# Altium footprint library amirlib.PcbLib: 456 footprints (part 27 of 29)
Each footprint in its own frame and in the unit in brackets; x right, y up, seen from the top. Pads: shape width x height; smd on the part's side, far side on the other; paste and mask are expansions set on the pad; w line width, h text height; cw(c..) or ccw(c..) is an arc to the next point about the centre after c.
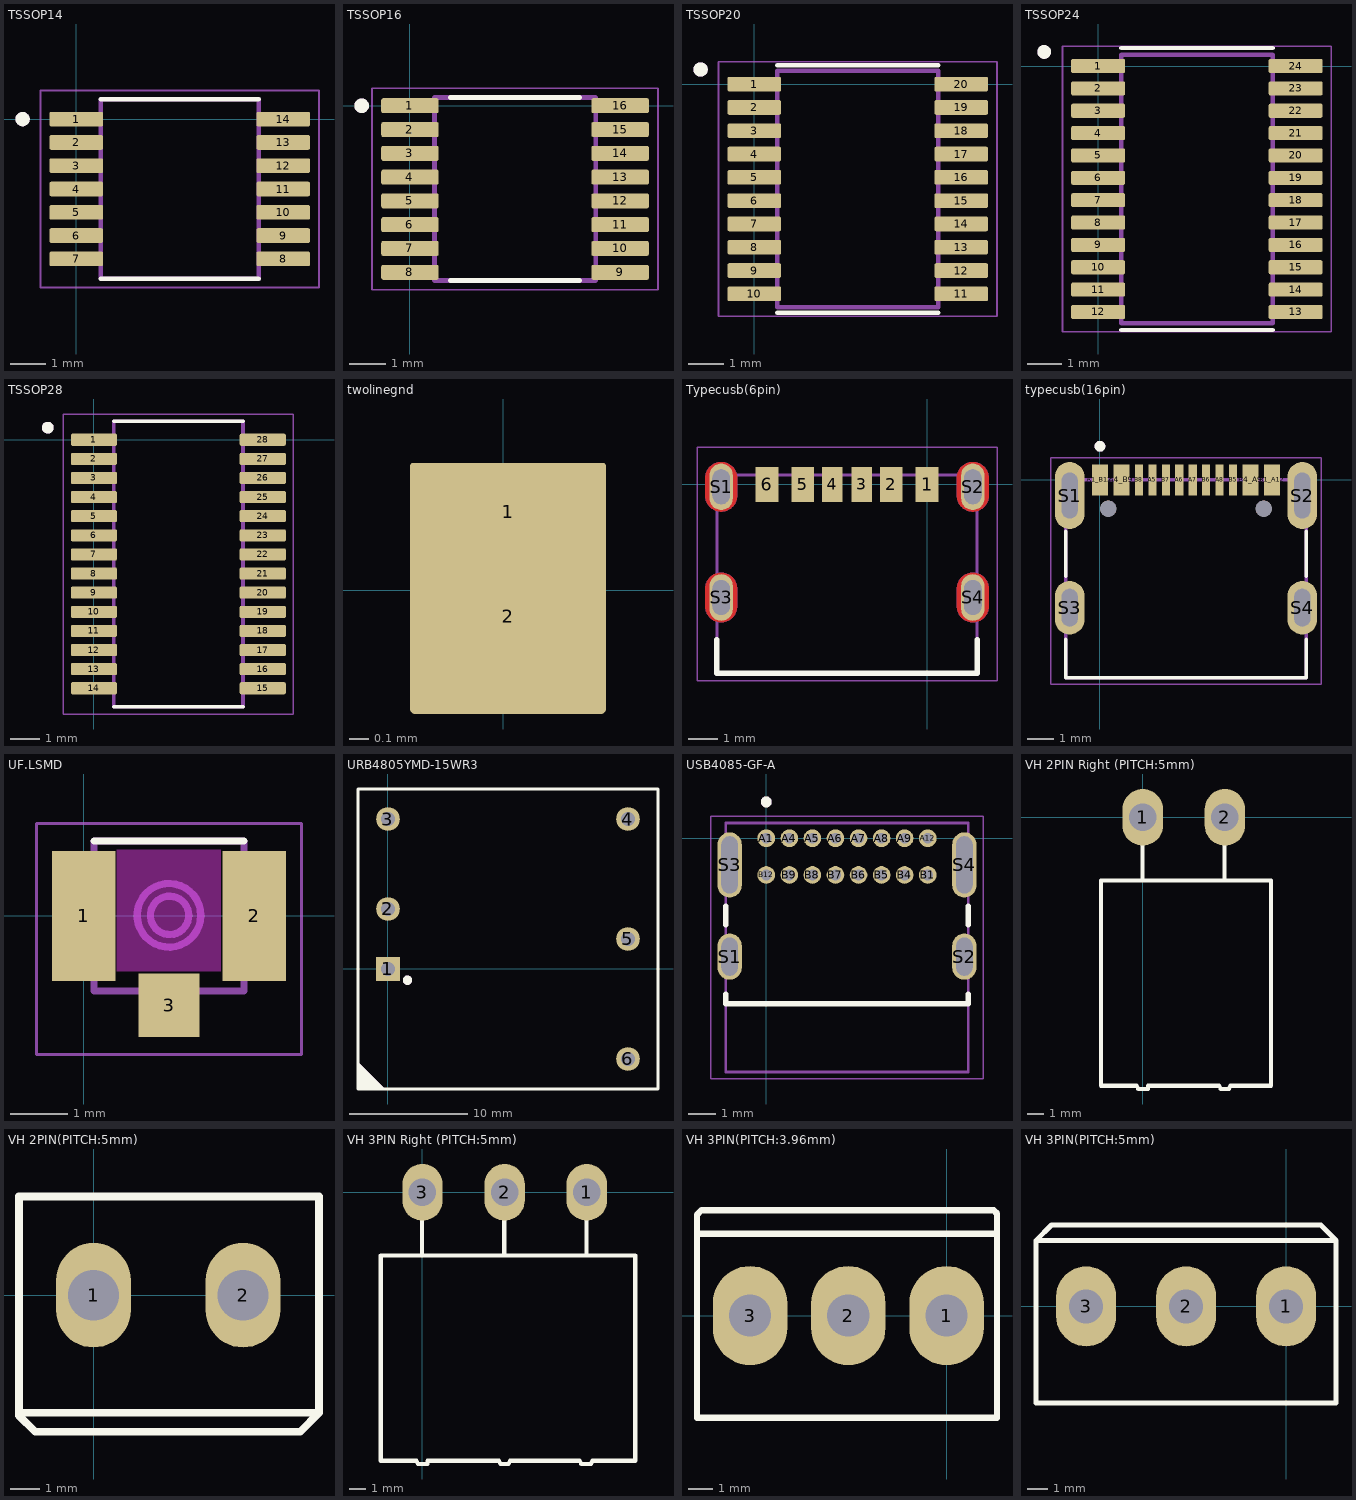
[diagram p26: the footprints below, top view; thin cyan lines are the x and y axes]

## TSSOP14 [mm]
pads (14):
  rrect25% 1.5x0.41 smd: 1(0,0) 2(0,-0.65) 3(0,-1.3) 4(0,-1.95) 5(0,-2.6) 6(0,-3.25) 7(0,-3.9) 8(5.77,-3.9) 9(5.77,-3.25) 10(5.77,-2.6) 11(5.77,-1.95) 12(5.77,-1.3) 13(5.77,-0.65) 14(5.77,0)
Top Overlay:
  circle w0.2: c-1.5,0 r0.1
  lines w0.127: 0.685,-4.45 5.085,-4.45 ; 0.685,0.55 5.085,0.55
Mechanical 13:
  circle w0.2: c-1.5,0 r0.1
  lines w0.127: 0.685,-4.45 5.085,-4.45 5.085,0.55 0.685,0.55 0.685,-4.45
Mechanical 15:
  lines w0.05: -1,-4.7 6.77,-4.7 6.77,0.8 -1,0.8 -1,-4.7
3D body "User Library-tssop14-2.STEP": height 1.2, standoff 0, extent -0.315,-4.5 6.085,0.6

## TSSOP16 [mm]
pads (16):
  rrect25% 1.57x0.41 smd: 1(0,0) 2(0,-0.65) 3(0,-1.3) 4(0,-1.95) 5(0,-2.6) 6(0,-3.25) 7(0,-3.9) 8(0,-4.55) 9(5.74,-4.55) 10(5.74,-3.9) 11(5.74,-3.25) 12(5.74,-2.6) 13(5.74,-1.95) 14(5.74,-1.3) 15(5.74,-0.65) 16(5.74,0)
Top Overlay:
  circle w0.2: c-1.32,0 r0.1
  lines w0.127: 1.105,-4.775 4.635,-4.775 ; 1.105,0.225 4.635,0.225
Mechanical 13:
  circle w0.2: c-1.32,0 r0.1
  lines w0.127: 0.67,-4.775 0.67,0.225 5.07,0.225 5.07,-4.775 0.67,-4.775
Mechanical 15:
  lines w0.05: -1.035,-5.025 -1.035,0.475 6.775,0.475 6.775,-5.025 -1.035,-5.025
3D body "step_temp.STEP": height 1.2, standoff 0, extent -0.33,-4.775 6.07,0.225

## TSSOP20 [mm]
pads (20):
  rrect25% 1.5x0.41 smd: 1(0,0) 2(0,-0.65) 3(0,-1.3) 4(0,-1.95) 5(0,-2.6) 6(0,-3.25) 7(0,-3.9) 8(0,-4.55) 9(0,-5.2) 10(0,-5.85) 11(5.77,-5.85) 12(5.77,-5.2) 13(5.77,-4.55) 14(5.77,-3.9) 15(5.77,-3.25) 16(5.77,-2.6) 17(5.77,-1.95) 18(5.77,-1.3) 19(5.77,-0.65) 20(5.77,0)
Top Overlay:
  circle w0.2: c-1.5,0.41 r0.1
  lines w0.127: 0.635,-6.375 5.135,-6.375 ; 0.635,0.525 5.135,0.525
Mechanical 13:
  circle w0.2: c-1.5,0.41 r0.1
  lines w0.127: 0.635,-6.225 0.635,0.375 5.135,0.375 5.135,-6.225 0.635,-6.225
Mechanical 15:
  lines w0.05: -1,-6.475 -1,0.625 6.77,0.625 6.77,-6.475 -1,-6.475
3D body "step_temp.STEP": height 1.1, standoff 0, extent -0.315,-6.175 6.085,0.325

## TSSOP24 [mm]
pads (24):
  rrect25% 1.57x0.41 smd: 1(0,0) 2(0,-0.65) 3(0,-1.3) 4(0,-1.95) 5(0,-2.6) 6(0,-3.25) 7(0,-3.9) 8(0,-4.55) 9(0,-5.2) 10(0,-5.85) 11(0,-6.5) 12(0,-7.15) 13(5.74,-7.15) 14(5.74,-6.5) 15(5.74,-5.85) 16(5.74,-5.2) 17(5.74,-4.55) 18(5.74,-3.9) 19(5.74,-3.25) 20(5.74,-2.6) 21(5.74,-1.95) 22(5.74,-1.3) 23(5.74,-0.65) 24(5.74,0)
Top Overlay:
  circle w0.2: c-1.57,0.41 r0.1
  lines w0.127: 0.67,-7.675 5.07,-7.675 ; 0.67,0.525 5.07,0.525
Mechanical 13:
  circle w0.2: c-1.57,0.41 r0.1
  lines w0.127: 0.67,-7.475 5.07,-7.475 5.07,0.325 0.67,0.325 0.67,-7.475
Mechanical 15:
  lines w0.05: -1.035,-7.725 6.775,-7.725 6.775,0.575 -1.035,0.575 -1.035,-7.725
3D body "step_temp.STEP": height 1.2, standoff 0, extent -0.33,-7.475 6.07,0.325

## TSSOP28 [mm]
pads (28):
  rrect25% 1.57x0.41 smd: 1(0,0) 2(0,-0.65) 3(0,-1.3) 4(0,-1.95) 5(0,-2.6) 6(0,-3.25) 7(0,-3.9) 8(0,-4.55) 9(0,-5.2) 10(0,-5.85) 11(0,-6.5) 12(0,-7.15) 13(0,-7.8) 14(0,-8.45) 15(5.74,-8.45) 16(5.74,-7.8) 17(5.74,-7.15) 18(5.74,-6.5) 19(5.74,-5.85) 20(5.74,-5.2) 21(5.74,-4.55) 22(5.74,-3.9) 23(5.74,-3.25) 24(5.74,-2.6) 25(5.74,-1.95) 26(5.74,-1.3) 27(5.74,-0.65) 28(5.74,0)
Top Overlay:
  circle w0.2: c-1.57,0.41 r0.1
  lines w0.127: 0.67,-9.075 5.07,-9.075 ; 0.67,0.625 5.07,0.625
Mechanical 13:
  circle w0.2: c-1.57,0.41 r0.1
  lines w0.127: 0.67,-9.075 0.67,0.625 5.07,0.625 5.07,-9.075 0.67,-9.075
Mechanical 15:
  lines w0.05: -1.035,-9.325 -1.035,0.875 6.775,0.875 6.775,-9.325 -1.035,-9.325
3D body "step_temp.STEP": height 1.1, standoff 0, extent -0.33,-9.075 6.07,0.625

## twolinegnd [mm]
pads (2):
  rrect5% 1x0.5 smd: 1(0.025,0.4)
  rrect5% 1x1 smd: 2(0.025,-0.132)
Top Layer:
  lines w0.5: 0.025,-0.132 0.025,0.4

## Typecusb(6pin) [mm]
pads (10):
  rect 0.8x1.2 smd: 1(0,0) 6(-5.5,0)
  rect 0.76x1.2 smd: 2(-1.23,0) 5(-4.27,0)
  rect 0.7x1.2 smd: 3(-2.25,0) 4(-3.25,0)
  oval 0.8x1.6 hole 0.6 slot 1.2 at 90 deg mask+0: S1(-7.07,-0.08) S2(1.57,-0.08) S3(-7.07,-3.88) S4(1.57,-3.88)
Top Layer:
  region: -7.041,-3.031 -7.013,-3.033 -6.984,-3.037 -6.956,-3.042 -6.928,-3.049 -6.9,-3.057 -6.873,-3.067 -6.846,-3.078 -6.82,-3.09 -6.795,-3.104 -6.77,-3.119 -6.747,-3.135 -6.724,-3.153 -6.702,-3.171 -6.681,-3.191 -6.661,-3.212 -6.643,-3.234 -6.625,-3.257 -6.609,-3.28 -6.594,-3.305 -6.58,-3.33 -6.568,-3.356 -6.557,-3.383 -6.547,-3.41 -6.539,-3.438 -6.532,-3.466 -6.527,-3.494 -6.523,-3.523 -6.521,-3.551 -6.52,-3.58 -6.52,-4.18 -6.521,-4.209 -6.523,-4.237 -6.527,-4.266 -6.532,-4.294 -6.539,-4.322 -6.547,-4.35 -6.557,-4.377 -6.568,-4.404 -6.58,-4.43 -6.594,-4.455 -6.609,-4.48 -6.625,-4.503 -6.643,-4.526 -6.661,-4.548 -6.681,-4.569 -6.702,-4.589 -6.724,-4.607 -6.747,-4.625 -6.77,-4.641 -6.795,-4.656 -6.82,-4.67 -6.846,-4.682 -6.873,-4.693 -6.9,-4.703 -6.928,-4.711 -6.956,-4.718 -6.984,-4.723 -7.013,-4.727 -7.041,-4.729 -7.07,-4.73 -7.099,-4.729 -7.127,-4.727 -7.156,-4.723 -7.184,-4.718 -7.212,-4.711 -7.24,-4.703 -7.267,-4.693 -7.294,-4.682 -7.32,-4.67 -7.345,-4.656 -7.37,-4.641 -7.393,-4.625 -7.416,-4.607 -7.438,-4.589 -7.459,-4.569 -7.479,-4.548 -7.497,-4.526 -7.515,-4.503 -7.531,-4.48 -7.546,-4.455 -7.56,-4.43 -7.572,-4.404 -7.583,-4.377 -7.593,-4.35 -7.601,-4.322 -7.608,-4.294 -7.613,-4.266 -7.617,-4.237 -7.619,-4.209 -7.62,-4.18 -7.62,-3.58 -7.619,-3.551 -7.617,-3.523 -7.613,-3.494 -7.608,-3.466 -7.601,-3.438 -7.593,-3.41 -7.583,-3.383 -7.572,-3.356 -7.56,-3.33 -7.546,-3.305 -7.531,-3.28 -7.515,-3.257 -7.497,-3.234 -7.479,-3.212 -7.459,-3.191 -7.438,-3.171 -7.416,-3.153 -7.393,-3.135 -7.37,-3.119 -7.345,-3.104 -7.32,-3.09 -7.294,-3.078 -7.267,-3.067 -7.24,-3.057 -7.212,-3.049 -7.184,-3.042 -7.156,-3.037 -7.127,-3.033 -7.099,-3.031 -7.07,-3.03
  region: 1.599,-3.031 1.627,-3.033 1.656,-3.037 1.684,-3.042 1.712,-3.049 1.74,-3.057 1.767,-3.067 1.794,-3.078 1.82,-3.09 1.845,-3.104 1.87,-3.119 1.893,-3.135 1.916,-3.153 1.938,-3.171 1.959,-3.191 1.979,-3.212 1.997,-3.234 2.015,-3.257 2.031,-3.28 2.046,-3.305 2.06,-3.33 2.072,-3.356 2.083,-3.383 2.093,-3.41 2.101,-3.438 2.108,-3.466 2.113,-3.494 2.117,-3.523 2.119,-3.551 2.12,-3.58 2.12,-4.18 2.119,-4.209 2.117,-4.237 2.113,-4.266 2.108,-4.294 2.101,-4.322 2.093,-4.35 2.083,-4.377 2.072,-4.404 2.06,-4.43 2.046,-4.455 2.031,-4.48 2.015,-4.503 1.997,-4.526 1.979,-4.548 1.959,-4.569 1.938,-4.589 1.916,-4.607 1.893,-4.625 1.87,-4.641 1.845,-4.656 1.82,-4.67 1.794,-4.682 1.767,-4.693 1.74,-4.703 1.712,-4.711 1.684,-4.718 1.656,-4.723 1.627,-4.727 1.599,-4.729 1.57,-4.73 1.541,-4.729 1.513,-4.727 1.484,-4.723 1.456,-4.718 1.428,-4.711 1.4,-4.703 1.373,-4.693 1.346,-4.682 1.32,-4.67 1.295,-4.656 1.27,-4.641 1.247,-4.625 1.224,-4.607 1.202,-4.589 1.181,-4.569 1.161,-4.548 1.143,-4.526 1.125,-4.503 1.109,-4.48 1.094,-4.455 1.08,-4.43 1.068,-4.404 1.057,-4.377 1.047,-4.35 1.039,-4.322 1.032,-4.294 1.027,-4.266 1.023,-4.237 1.021,-4.209 1.02,-4.18 1.02,-3.58 1.021,-3.551 1.023,-3.523 1.027,-3.494 1.032,-3.466 1.039,-3.438 1.047,-3.41 1.057,-3.383 1.068,-3.356 1.08,-3.33 1.094,-3.305 1.109,-3.28 1.125,-3.257 1.143,-3.234 1.161,-3.212 1.181,-3.191 1.202,-3.171 1.224,-3.153 1.247,-3.135 1.27,-3.119 1.295,-3.104 1.32,-3.09 1.346,-3.078 1.373,-3.067 1.4,-3.057 1.428,-3.049 1.456,-3.042 1.484,-3.037 1.513,-3.033 1.541,-3.031 1.57,-3.03
  region: -7.041,0.769 -7.013,0.767 -6.984,0.763 -6.956,0.758 -6.928,0.751 -6.9,0.743 -6.873,0.733 -6.846,0.722 -6.82,0.71 -6.795,0.696 -6.77,0.681 -6.747,0.665 -6.724,0.647 -6.702,0.629 -6.681,0.609 -6.661,0.588 -6.643,0.566 -6.625,0.543 -6.609,0.52 -6.594,0.495 -6.58,0.47 -6.568,0.444 -6.557,0.417 -6.547,0.39 -6.539,0.362 -6.532,0.334 -6.527,0.306 -6.523,0.277 -6.521,0.249 -6.52,0.22 -6.52,-0.38 -6.521,-0.409 -6.523,-0.437 -6.527,-0.466 -6.532,-0.494 -6.539,-0.522 -6.547,-0.55 -6.557,-0.577 -6.568,-0.604 -6.58,-0.63 -6.594,-0.655 -6.609,-0.68 -6.625,-0.703 -6.643,-0.726 -6.661,-0.748 -6.681,-0.769 -6.702,-0.789 -6.724,-0.807 -6.747,-0.825 -6.77,-0.841 -6.795,-0.856 -6.82,-0.87 -6.846,-0.882 -6.873,-0.893 -6.9,-0.903 -6.928,-0.911 -6.956,-0.918 -6.984,-0.923 -7.013,-0.927 -7.041,-0.929 -7.07,-0.93 -7.099,-0.929 -7.127,-0.927 -7.156,-0.923 -7.184,-0.918 -7.212,-0.911 -7.24,-0.903 -7.267,-0.893 -7.294,-0.882 -7.32,-0.87 -7.345,-0.856 -7.37,-0.841 -7.393,-0.825 -7.416,-0.807 -7.438,-0.789 -7.459,-0.769 -7.479,-0.748 -7.497,-0.726 -7.515,-0.703 -7.531,-0.68 -7.546,-0.655 -7.56,-0.63 -7.572,-0.604 -7.583,-0.577 -7.593,-0.55 -7.601,-0.522 -7.608,-0.494 -7.613,-0.466 -7.617,-0.437 -7.619,-0.409 -7.62,-0.38 -7.62,0.22 -7.619,0.249 -7.617,0.277 -7.613,0.306 -7.608,0.334 -7.601,0.362 -7.593,0.39 -7.583,0.417 -7.572,0.444 -7.56,0.47 -7.546,0.495 -7.531,0.52 -7.515,0.543 -7.497,0.566 -7.479,0.588 -7.459,0.609 -7.438,0.629 -7.416,0.647 -7.393,0.665 -7.37,0.681 -7.345,0.696 -7.32,0.71 -7.294,0.722 -7.267,0.733 -7.24,0.743 -7.212,0.751 -7.184,0.758 -7.156,0.763 -7.127,0.767 -7.099,0.769 -7.07,0.77
  region: 1.599,0.769 1.627,0.767 1.656,0.763 1.684,0.758 1.712,0.751 1.74,0.743 1.767,0.733 1.794,0.722 1.82,0.71 1.845,0.696 1.87,0.681 1.893,0.665 1.916,0.647 1.938,0.629 1.959,0.609 1.979,0.588 1.997,0.566 2.015,0.543 2.031,0.52 2.046,0.495 2.06,0.47 2.072,0.444 2.083,0.417 2.093,0.39 2.101,0.362 2.108,0.334 2.113,0.306 2.117,0.277 2.119,0.249 2.12,0.22 2.12,-0.38 2.119,-0.409 2.117,-0.437 2.113,-0.466 2.108,-0.494 2.101,-0.522 2.093,-0.55 2.083,-0.577 2.072,-0.604 2.06,-0.63 2.046,-0.655 2.031,-0.68 2.015,-0.703 1.997,-0.726 1.979,-0.748 1.959,-0.769 1.938,-0.789 1.916,-0.807 1.893,-0.825 1.87,-0.841 1.845,-0.856 1.82,-0.87 1.794,-0.882 1.767,-0.893 1.74,-0.903 1.712,-0.911 1.684,-0.918 1.656,-0.923 1.627,-0.927 1.599,-0.929 1.57,-0.93 1.541,-0.929 1.513,-0.927 1.484,-0.923 1.456,-0.918 1.428,-0.911 1.4,-0.903 1.373,-0.893 1.346,-0.882 1.32,-0.87 1.295,-0.856 1.27,-0.841 1.247,-0.825 1.224,-0.807 1.202,-0.789 1.181,-0.769 1.161,-0.748 1.143,-0.726 1.125,-0.703 1.109,-0.68 1.094,-0.655 1.08,-0.63 1.068,-0.604 1.057,-0.577 1.047,-0.55 1.039,-0.522 1.032,-0.494 1.027,-0.466 1.023,-0.437 1.021,-0.409 1.02,-0.38 1.02,0.22 1.021,0.249 1.023,0.277 1.027,0.306 1.032,0.334 1.039,0.362 1.047,0.39 1.057,0.417 1.068,0.444 1.08,0.47 1.094,0.495 1.109,0.52 1.125,0.543 1.143,0.566 1.161,0.588 1.181,0.609 1.202,0.629 1.224,0.647 1.247,0.665 1.27,0.681 1.295,0.696 1.32,0.71 1.346,0.722 1.373,0.733 1.4,0.743 1.428,0.751 1.456,0.758 1.484,0.763 1.513,0.767 1.541,0.769 1.57,0.77
Bottom Layer:
  region: -7.041,-3.031 -7.013,-3.033 -6.984,-3.037 -6.956,-3.042 -6.928,-3.049 -6.9,-3.057 -6.873,-3.067 -6.846,-3.078 -6.82,-3.09 -6.795,-3.104 -6.77,-3.119 -6.747,-3.135 -6.724,-3.153 -6.702,-3.171 -6.681,-3.191 -6.661,-3.212 -6.643,-3.234 -6.625,-3.257 -6.609,-3.28 -6.594,-3.305 -6.58,-3.33 -6.568,-3.356 -6.557,-3.383 -6.547,-3.41 -6.539,-3.438 -6.532,-3.466 -6.527,-3.494 -6.523,-3.523 -6.521,-3.551 -6.52,-3.58 -6.52,-4.18 -6.521,-4.209 -6.523,-4.237 -6.527,-4.266 -6.532,-4.294 -6.539,-4.322 -6.547,-4.35 -6.557,-4.377 -6.568,-4.404 -6.58,-4.43 -6.594,-4.455 -6.609,-4.48 -6.625,-4.503 -6.643,-4.526 -6.661,-4.548 -6.681,-4.569 -6.702,-4.589 -6.724,-4.607 -6.747,-4.625 -6.77,-4.641 -6.795,-4.656 -6.82,-4.67 -6.846,-4.682 -6.873,-4.693 -6.9,-4.703 -6.928,-4.711 -6.956,-4.718 -6.984,-4.723 -7.013,-4.727 -7.041,-4.729 -7.07,-4.73 -7.099,-4.729 -7.127,-4.727 -7.156,-4.723 -7.184,-4.718 -7.212,-4.711 -7.24,-4.703 -7.267,-4.693 -7.294,-4.682 -7.32,-4.67 -7.345,-4.656 -7.37,-4.641 -7.393,-4.625 -7.416,-4.607 -7.438,-4.589 -7.459,-4.569 -7.479,-4.548 -7.497,-4.526 -7.515,-4.503 -7.531,-4.48 -7.546,-4.455 -7.56,-4.43 -7.572,-4.404 -7.583,-4.377 -7.593,-4.35 -7.601,-4.322 -7.608,-4.294 -7.613,-4.266 -7.617,-4.237 -7.619,-4.209 -7.62,-4.18 -7.62,-3.58 -7.619,-3.551 -7.617,-3.523 -7.613,-3.494 -7.608,-3.466 -7.601,-3.438 -7.593,-3.41 -7.583,-3.383 -7.572,-3.356 -7.56,-3.33 -7.546,-3.305 -7.531,-3.28 -7.515,-3.257 -7.497,-3.234 -7.479,-3.212 -7.459,-3.191 -7.438,-3.171 -7.416,-3.153 -7.393,-3.135 -7.37,-3.119 -7.345,-3.104 -7.32,-3.09 -7.294,-3.078 -7.267,-3.067 -7.24,-3.057 -7.212,-3.049 -7.184,-3.042 -7.156,-3.037 -7.127,-3.033 -7.099,-3.031 -7.07,-3.03
  region: 1.599,-3.031 1.627,-3.033 1.656,-3.037 1.684,-3.042 1.712,-3.049 1.74,-3.057 1.767,-3.067 1.794,-3.078 1.82,-3.09 1.845,-3.104 1.87,-3.119 1.893,-3.135 1.916,-3.153 1.938,-3.171 1.959,-3.191 1.979,-3.212 1.997,-3.234 2.015,-3.257 2.031,-3.28 2.046,-3.305 2.06,-3.33 2.072,-3.356 2.083,-3.383 2.093,-3.41 2.101,-3.438 2.108,-3.466 2.113,-3.494 2.117,-3.523 2.119,-3.551 2.12,-3.58 2.12,-4.18 2.119,-4.209 2.117,-4.237 2.113,-4.266 2.108,-4.294 2.101,-4.322 2.093,-4.35 2.083,-4.377 2.072,-4.404 2.06,-4.43 2.046,-4.455 2.031,-4.48 2.015,-4.503 1.997,-4.526 1.979,-4.548 1.959,-4.569 1.938,-4.589 1.916,-4.607 1.893,-4.625 1.87,-4.641 1.845,-4.656 1.82,-4.67 1.794,-4.682 1.767,-4.693 1.74,-4.703 1.712,-4.711 1.684,-4.718 1.656,-4.723 1.627,-4.727 1.599,-4.729 1.57,-4.73 1.541,-4.729 1.513,-4.727 1.484,-4.723 1.456,-4.718 1.428,-4.711 1.4,-4.703 1.373,-4.693 1.346,-4.682 1.32,-4.67 1.295,-4.656 1.27,-4.641 1.247,-4.625 1.224,-4.607 1.202,-4.589 1.181,-4.569 1.161,-4.548 1.143,-4.526 1.125,-4.503 1.109,-4.48 1.094,-4.455 1.08,-4.43 1.068,-4.404 1.057,-4.377 1.047,-4.35 1.039,-4.322 1.032,-4.294 1.027,-4.266 1.023,-4.237 1.021,-4.209 1.02,-4.18 1.02,-3.58 1.021,-3.551 1.023,-3.523 1.027,-3.494 1.032,-3.466 1.039,-3.438 1.047,-3.41 1.057,-3.383 1.068,-3.356 1.08,-3.33 1.094,-3.305 1.109,-3.28 1.125,-3.257 1.143,-3.234 1.161,-3.212 1.181,-3.191 1.202,-3.171 1.224,-3.153 1.247,-3.135 1.27,-3.119 1.295,-3.104 1.32,-3.09 1.346,-3.078 1.373,-3.067 1.4,-3.057 1.428,-3.049 1.456,-3.042 1.484,-3.037 1.513,-3.033 1.541,-3.031 1.57,-3.03
  region: -7.041,0.769 -7.013,0.767 -6.984,0.763 -6.956,0.758 -6.928,0.751 -6.9,0.743 -6.873,0.733 -6.846,0.722 -6.82,0.71 -6.795,0.696 -6.77,0.681 -6.747,0.665 -6.724,0.647 -6.702,0.629 -6.681,0.609 -6.661,0.588 -6.643,0.566 -6.625,0.543 -6.609,0.52 -6.594,0.495 -6.58,0.47 -6.568,0.444 -6.557,0.417 -6.547,0.39 -6.539,0.362 -6.532,0.334 -6.527,0.306 -6.523,0.277 -6.521,0.249 -6.52,0.22 -6.52,-0.38 -6.521,-0.409 -6.523,-0.437 -6.527,-0.466 -6.532,-0.494 -6.539,-0.522 -6.547,-0.55 -6.557,-0.577 -6.568,-0.604 -6.58,-0.63 -6.594,-0.655 -6.609,-0.68 -6.625,-0.703 -6.643,-0.726 -6.661,-0.748 -6.681,-0.769 -6.702,-0.789 -6.724,-0.807 -6.747,-0.825 -6.77,-0.841 -6.795,-0.856 -6.82,-0.87 -6.846,-0.882 -6.873,-0.893 -6.9,-0.903 -6.928,-0.911 -6.956,-0.918 -6.984,-0.923 -7.013,-0.927 -7.041,-0.929 -7.07,-0.93 -7.099,-0.929 -7.127,-0.927 -7.156,-0.923 -7.184,-0.918 -7.212,-0.911 -7.24,-0.903 -7.267,-0.893 -7.294,-0.882 -7.32,-0.87 -7.345,-0.856 -7.37,-0.841 -7.393,-0.825 -7.416,-0.807 -7.438,-0.789 -7.459,-0.769 -7.479,-0.748 -7.497,-0.726 -7.515,-0.703 -7.531,-0.68 -7.546,-0.655 -7.56,-0.63 -7.572,-0.604 -7.583,-0.577 -7.593,-0.55 -7.601,-0.522 -7.608,-0.494 -7.613,-0.466 -7.617,-0.437 -7.619,-0.409 -7.62,-0.38 -7.62,0.22 -7.619,0.249 -7.617,0.277 -7.613,0.306 -7.608,0.334 -7.601,0.362 -7.593,0.39 -7.583,0.417 -7.572,0.444 -7.56,0.47 -7.546,0.495 -7.531,0.52 -7.515,0.543 -7.497,0.566 -7.479,0.588 -7.459,0.609 -7.438,0.629 -7.416,0.647 -7.393,0.665 -7.37,0.681 -7.345,0.696 -7.32,0.71 -7.294,0.722 -7.267,0.733 -7.24,0.743 -7.212,0.751 -7.184,0.758 -7.156,0.763 -7.127,0.767 -7.099,0.769 -7.07,0.77
  region: 1.599,0.769 1.627,0.767 1.656,0.763 1.684,0.758 1.712,0.751 1.74,0.743 1.767,0.733 1.794,0.722 1.82,0.71 1.845,0.696 1.87,0.681 1.893,0.665 1.916,0.647 1.938,0.629 1.959,0.609 1.979,0.588 1.997,0.566 2.015,0.543 2.031,0.52 2.046,0.495 2.06,0.47 2.072,0.444 2.083,0.417 2.093,0.39 2.101,0.362 2.108,0.334 2.113,0.306 2.117,0.277 2.119,0.249 2.12,0.22 2.12,-0.38 2.119,-0.409 2.117,-0.437 2.113,-0.466 2.108,-0.494 2.101,-0.522 2.093,-0.55 2.083,-0.577 2.072,-0.604 2.06,-0.63 2.046,-0.655 2.031,-0.68 2.015,-0.703 1.997,-0.726 1.979,-0.748 1.959,-0.769 1.938,-0.789 1.916,-0.807 1.893,-0.825 1.87,-0.841 1.845,-0.856 1.82,-0.87 1.794,-0.882 1.767,-0.893 1.74,-0.903 1.712,-0.911 1.684,-0.918 1.656,-0.923 1.627,-0.927 1.599,-0.929 1.57,-0.93 1.541,-0.929 1.513,-0.927 1.484,-0.923 1.456,-0.918 1.428,-0.911 1.4,-0.903 1.373,-0.893 1.346,-0.882 1.32,-0.87 1.295,-0.856 1.27,-0.841 1.247,-0.825 1.224,-0.807 1.202,-0.789 1.181,-0.769 1.161,-0.748 1.143,-0.726 1.125,-0.703 1.109,-0.68 1.094,-0.655 1.08,-0.63 1.068,-0.604 1.057,-0.577 1.047,-0.55 1.039,-0.522 1.032,-0.494 1.027,-0.466 1.023,-0.437 1.021,-0.409 1.02,-0.38 1.02,0.22 1.021,0.249 1.023,0.277 1.027,0.306 1.032,0.334 1.039,0.362 1.047,0.39 1.057,0.417 1.068,0.444 1.08,0.47 1.094,0.495 1.109,0.52 1.125,0.543 1.143,0.566 1.161,0.588 1.181,0.609 1.202,0.629 1.224,0.647 1.247,0.665 1.27,0.681 1.295,0.696 1.32,0.71 1.346,0.722 1.373,0.733 1.4,0.743 1.428,0.751 1.456,0.758 1.484,0.763 1.513,0.767 1.541,0.769 1.57,0.77
Top Overlay:
  lines w0.2: -7.22,-5.33 -7.22,-6.48 1.72,-6.48 1.72,-5.33
Top Solder:
  drawing of 4 lines, arcs and shapes, not listed
Bottom Solder:
  drawing of 4 lines, arcs and shapes, not listed
Mechanical 13:
  lines w0.1: -7.22,-6.48 1.72,-6.48 1.72,0.32 -7.22,0.32 -7.22,-6.48
Mechanical 15:
  lines w0.05: -7.9,-6.73 2.4,-6.73 2.4,1.27 -7.9,1.27 -7.9,-6.73
3D body "USB4125-GF-A-0190--3DModel-STEP-56544.STEP": height 3.26, standoff -2.15, extent -7.22,-6.403 1.72,0.497

## typecusb(16pin) [mm]
pads (18):
  rect 0.6x1.14 smd mask+0.05: A1_B12(0,0) A4_B9(0.8,0) B1_A12(6.4,0) B4_A9(5.6,0)
  rect 0.3x1.14 smd mask+0.05: A5(1.95,0) A6(2.95,0) A7(3.45,0) A8(4.45,0) B5(4.95,0) B6(3.95,0) B7(2.45,0) B8(1.45,0)
  oval 1.1x2.5 hole 0.6 slot 1.7 at 90 deg: S1(-1.125,-0.58) S2(7.525,-0.58)
  oval 1.1x2 hole 0.6 slot 1.4 at 90 deg: S3(-1.125,-4.75) S4(7.525,-4.75)
  round 0.6 hole 0.6 unplated: ""(0.31,-1.07) ""(6.09,-1.07)
Top Overlay:
  circle w0.2: c0,1.25 r0.1
  lines w0.127: -1.27,-5.92 -1.27,-7.35 7.67,-7.35 7.67,-5.92 ; -1.27,-3.58 -1.27,-1.9 ; 7.67,-3.58 7.67,-1.9
Mechanical 13:
  circle w0.2: c0,1.25 r0.1
  lines w0.127: -1.27,-7.35 7.67,-7.35 7.67,0 -1.27,0 -1.27,-7.35
Mechanical 15:
  lines w0.05: -1.825,-7.6 -1.825,0.82 8.225,0.82 8.225,-7.6 -1.825,-7.6
3D body "step_temp.STEP": height 3.31, standoff -0.99, extent -1.27,-7.35 7.67,0.555

## UF.LSMD [mm]
pads (3):
  rect 1.1x2.25 smd: 1(0,0) 2(2.95,0)
  rect 1.05x1.1 smd: 3(1.475,-1.55)
Top Overlay:
  lines w0.127: 0.175,1.3 2.775,1.3
Keep-Out Layer:
  region: 2.375,-0.963 0.572,-0.963 0.572,1.15 2.375,1.15
Mechanical 13:
  circle w0.127: c1.485,0.01 r0.332
  circle w0.127: c1.475,0.01 r0.552
  lines w0.127: 0.145,0.88 0.145,0.87 -0.095,0.87 -0.095,-0.87 0.175,-0.87 ; 2.815,-0.87 3.045,-0.87 3.045,0.87 2.855,0.87 ; 0.175,-0.87 0.175,-1.3 2.775,-1.3 2.775,1.3 0.175,1.3 0.175,-0.87
Mechanical 14:
  lines w0.127: 2.815,-0.91 2.815,-0.9
Mechanical 15:
  lines w0.05: -0.825,-2.4 -0.825,1.6 3.775,1.6 3.775,-2.4 -0.825,-2.4
3D body "step_temp.STEP": height 1.25, standoff 0, extent -0.025,-1.55 2.975,1.55

## URB4805YMD-15WR3 [mm]
pads (6):
  rect 2x2 hole 1.2 paste-2539.97 mask+0.05: 1(0,0)
  round 2 hole 1.2 paste-2539.97 mask+0.05: 2(0,5.08) 3(0,12.7) 4(20.32,12.7) 5(20.32,2.54) 6(20.32,-7.62)
Top Overlay:
  circle w0.4: c1.65,-0.95 r0.2
  region: -2.54,-10.16 -2.54,-7.874 -2.413,-8.001 -0.254,-10.16
  lines w0.254: -2.54,-10.16 -2.54,15.24 22.86,15.24 22.86,-10.16 -2.54,-10.16
Mechanical 15:
  circle w0.4: c1.65,-0.95 r0.2
  region: -2.54,-10.16 -2.54,-7.874 -2.413,-8.001 -0.254,-10.16

## USB4085-GF-A [mm]
pads (20):
  round 0.65 hole 0.4: A1(0,0) A4(0.85,0) A5(1.7,0) A6(2.55,0) A7(3.4,0) A8(4.25,0) A9(5.1,0) A12(5.95,0) B1(5.95,-1.35) B4(5.1,-1.35) B5(4.25,-1.35) B6(3.4,-1.35) B7(2.55,-1.35) B8(1.7,-1.35) B9(0.85,-1.35) B12(0,-1.35)
  oval 0.9x1.7 hole 0.6 slot 1.4 at 90 deg: S1(-1.35,-4.36) S2(7.3,-4.36)
  oval 0.9x2.4 hole 0.6 slot 2.1 at 90 deg: S3(-1.35,-0.98) S4(7.3,-0.98)
Top Overlay:
  circle w0.2: c0,1.34 r0.1
  lines w0.2: -1.495,-5.75 -1.495,-6.1 7.445,-6.1 7.445,-5.75 ; -1.495,-3.19 -1.495,-2.51 ; 7.445,-3.19 7.445,-2.51
Mechanical 13:
  circle w0.2: c0,1.34 r0.1
  lines w0.1: -1.495,-8.61 -1.495,-6.1 -1.495,0.56 7.445,0.56 7.445,-8.61 -1.495,-8.61
Mechanical 15:
  lines w0.05: -2.05,-8.86 -2.05,0.81 8,0.81 8,-8.86 -2.05,-8.86
3D body "step_temp.STEP": height 3.46, standoff -2.1, extent -1.495,-8.61 7.445,0.56

## VH 2PIN Right (PITCH:5mm) [mm]
pads (2):
  oval 2.5x3.5 hole 1.7 paste-2539.97 mask+0.05: 1(0,0) 2(5.08,0)
Top Overlay:
  lines w0.254: -0.02,-3.8 -0.02,-1.531 ; 5.06,-3.8 5.06,-1.531 ; -2.58,-16.6 -0.38,-16.6 -0.28,-16.8 0.32,-16.8 0.32,-16.6 4.72,-16.6 4.82,-16.8 5.32,-16.8 5.42,-16.6 7.925,-16.6 7.925,-3.9 -2.58,-3.9 -2.58,-16.6

## VH 2PIN(PITCH:5mm) [mm]
pads (2):
  oval 2.5x3.5 hole 1.7: 1(0,0) 2(5,0)
Top Overlay:
  lines w0.254: -2.493,3.302 7.507,3.302 ; -2.493,3.316 -2.493,-3.937 ; 7.54,3.302 7.54,-3.937 ; -2.493,-3.937 -2.493,-4.024 -1.945,-4.572 6.905,-4.572 7.54,-3.937 ; -2.493,-3.937 7.54,-3.937
3D body "2ps-io-arc&motor.STEP": height 10.08, standoff -3.51, extent -2.522,-4.663 7.536,3.302

## VH 3PIN Right (PITCH:5mm) [mm]
pads (3):
  oval 2.5x3.5 hole 1.7 paste-2539.97 mask+0.05: 1(10.16,0) 2(5.08,0) 3(0,0)
Top Overlay:
  lines w0.254: -0.02,-3.8 -0.02,-1.531 ; 5.06,-3.8 5.06,-1.531 ; 10.14,-3.8 10.14,-1.531 ; -2.58,-16.6 -0.38,-16.6 -0.28,-16.8 0.32,-16.8 0.32,-16.6 4.72,-16.6 4.82,-16.8 5.32,-16.8 5.42,-16.6 9.72,-16.6 9.82,-16.8 10.42,-16.8 10.52,-16.6 13.157,-16.6 13.157,-3.9 -2.58,-3.9 -2.58,-16.6

## VH 3PIN(PITCH:3.96mm) [mm]
pads (3):
  oval 3x4 hole 1.7: 1(0,0) 2(-3.96,0) 3(-7.92,0)
Top Overlay:
  lines w0.254: -10.058,3.302 2.032,3.302 ; 1.907,4.24 2.032,4.115 2.032,-4.115 -10.058,-4.115 -10.058,4.064 -9.881,4.242 1.907,4.242
3D body "C5379869_SHOU_HAN_VH3.96-3P_ZZ.step": height 10.9, standoff -3.5, extent -9.928,-4.009 1.952,4.191

## VH 3PIN(PITCH:5mm) [mm]
pads (3):
  oval 3x4 hole 1.7: 1(0,0) 2(-5,0) 3(-10,0)
Top Overlay:
  lines w0.254: -12.507,3.302 -12.507,-4.812 -12.493,-4.826 2.493,-4.826 2.493,3.302 ; -12.507,3.302 2.493,3.302 ; -12.507,3.302 -12.493,3.302 -11.731,4.064 0.715,4.064 1.731,4.064 2.493,3.302
3D body "3PS-IO-TRANS.STEP": height 10.06, standoff -3.53, extent -12.601,-4.966 2.347,3.047